# Altium footprint library WE-PD2_7850.PcbLib: 1 footprints
Each footprint in its own frame and in the unit in brackets; x right, y up, seen from the top. Pads: shape width x height; smd on the part's side, far side on the other; paste and mask are expansions set on the pad; w line width, h text height; cw(c..) or ccw(c..) is an arc to the next point about the centre after c.
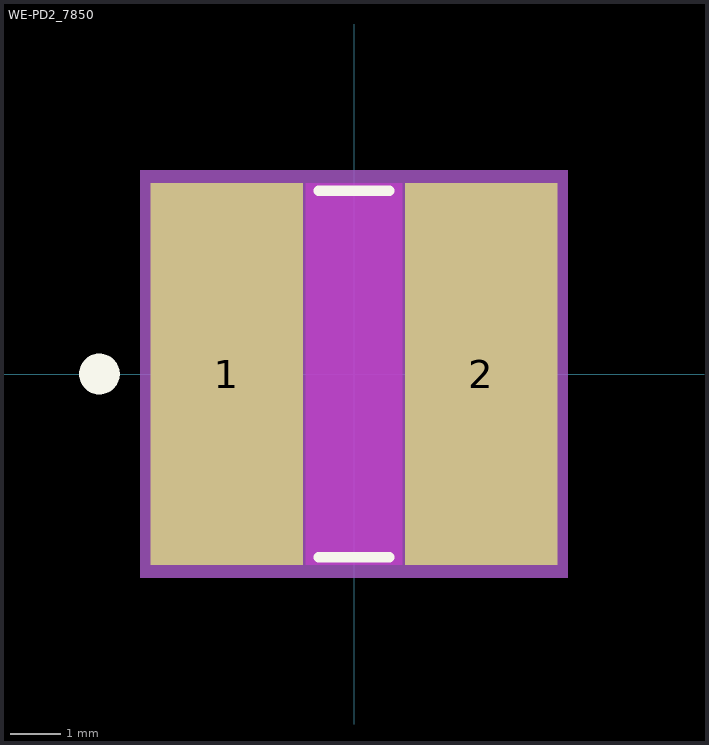
[diagram p0: the footprint, top view; thin cyan lines are the x and y axes]

## WE-PD2_7850 [mm]
pads (2):
  rect 3x7.5 smd paste+0 mask+0.102: 1(-2.5,0) 2(2.5,0)
Top Overlay:
  circle w0.4: c-5,0 r0.2
  lines w0.2: -0.7,-3.6 0.7,-3.6 ; -0.7,3.6 0.7,3.6
Keep-Out Layer:
  region: 0.95,-3.75 -0.95,-3.75 -0.95,3.75 0.95,3.75
Assembly Top:
  lines w0.1: -1.72,3.5 -1.71,3.5 ; 1.7,-3.5 -1.7,-3.5 -1.97,-3.37 -2.23,-3.2 -2.52,-2.98 -2.88,-2.64 -3.17,-2.27 -3.38,-1.95 -3.58,-1.55 -3.73,-1.16 -3.82,-0.81 -3.88,-0.42 -3.9,-0.12 -3.89,0.25 -3.85,0.66 -3.73,1.16 -3.57,1.58 -3.38,1.96 -3.18,2.27 -2.88,2.63 -2.72,2.8 -2.45,3.04 -2.24,3.19 -2.04,3.33 -1.81,3.45 -1.71,3.5 ; 1.71,-3.5 1.85,-3.43 2.06,-3.31 2.25,-3.19 2.53,-2.97 2.75,-2.77 2.97,-2.53 3.15,-2.31 3.33,-2.03 3.5,-1.73 3.66,-1.37 3.77,-1.02 3.85,-0.65 3.89,-0.27 3.9,0.02 3.89,0.34 3.84,0.73 3.74,1.12 3.64,1.42 3.5,1.72 3.32,2.05 3.14,2.32 2.93,2.57 2.63,2.88 2.36,3.11 2.04,3.32 1.72,3.5 -1.71,3.5
Courtyard Top:
  region: 4.2,-4 -4.2,-4 -4.2,4 4.2,4
3D body "WE-PD2_7850_2+(rev1).stp": height 4.93, standoff -0.02, extent -3.373,-3.813 3.627,3.813